# Altium schematic symbol library VL53L1CXV0FY_1.SchLib: 1 symbol
Pins are listed as number, name and electrical type; pins without a type are passive.

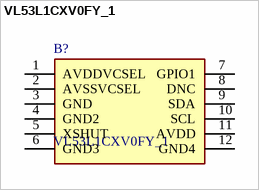
[diagram p0: symbol VL53L1CXV0FY_1]

## VL53L1CXV0FY_1
designator B?
A new generation, long distance ranging Time-of-Flight sensor based on ST's FlightSense technology; Manufacturer_Name: STMicroelectronics; Manufacturer_Part_Number: VL53L1CXV0FY/1; Geometry.Height: 1mm; Mouser Part Number: 511-VL53L1CXV0FY/1; Mouser Price/Stock: https://www.mouser.co.uk/ProductDetail/STMicroelectronics/VL53L1CXV0FY-1?qs=W0yvOO0ixfFQE5v5L6h6PA%3D%3D; Arrow Part Number: VL53L1CXV0FY/1; Arrow Price/Stock: https://www.arrow.com/en/products/vl53l1cxv0fy1/stmicroelectronics.html?utm_currency=USD&region=nac; Datasheet Link: https://www.st.com/resource/en/datasheet/vl53l1x.pdf
footprint VL53L1CXV0FY1
pins: 1 AVDDVCSEL, 2 AVSSVCSEL, 3 GND, 4 GND2, 5 XSHUT, 6 GND3, 7 GPIO1, 8 DNC, 9 SDA, 10 SCL, 11 AVDD, 12 GND4